# Altium schematic symbol library 一体板.SchLib: 66 symbols
Pins are listed as number, name and electrical type; pins without a type are passive.

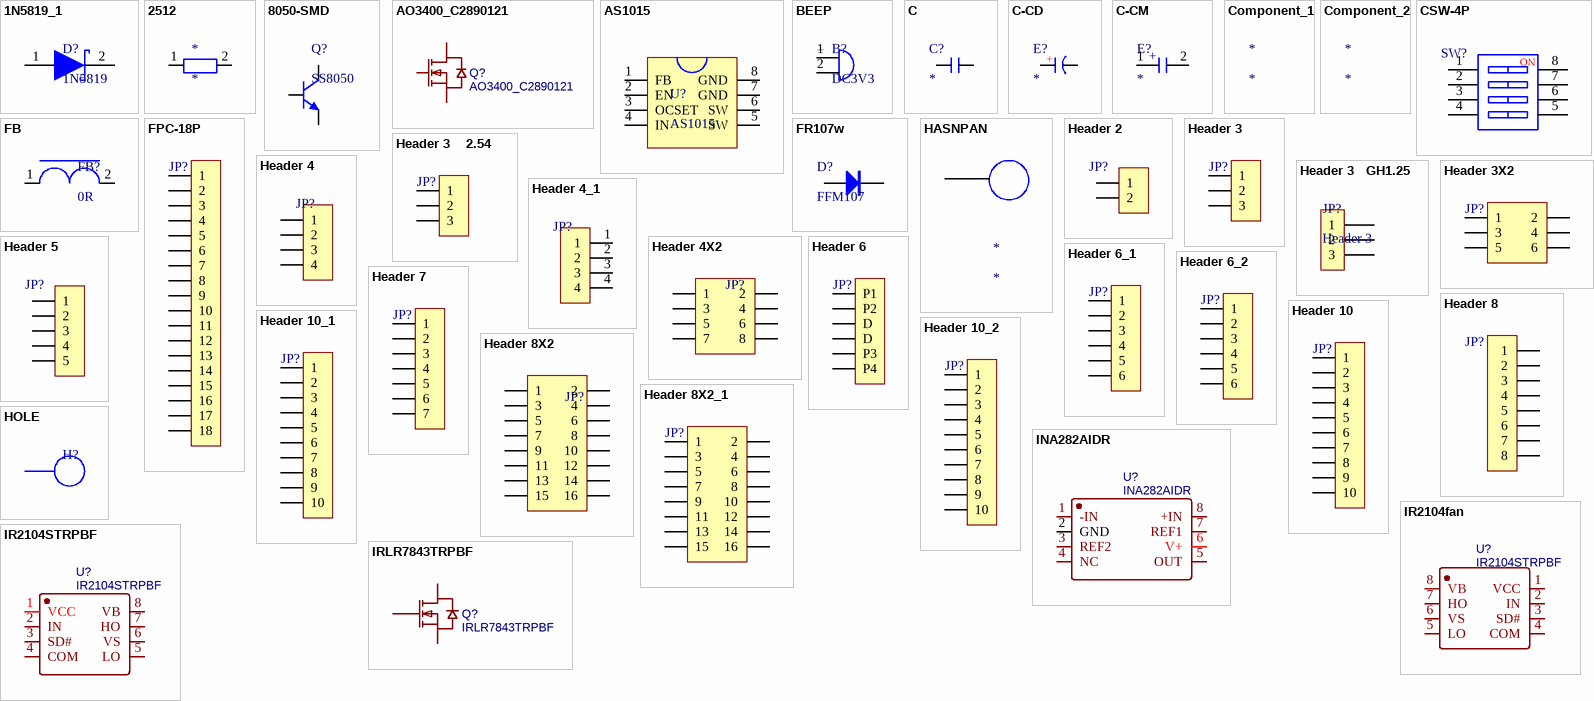
[diagram p0: symbols 1N5819_1 to IRLR7843TRPBF]

## 1N5819_1
designator D?, comment 1N5819
二极管
footprint SOD-123 (2.7x1.6X1.1mm（长宽高，不包括引脚）)
pins: 1, 2

## 2512
designator *
footprint R 2512_M (1W贴片电阻)
pins: 1, 2

## 8050-SMD
designator Q?, comment SS8050
高频放大-NPN型; 版权归属: 源创客; 属性: 40V 1.5A 1W 100MHZ; BOM名称: 高频放大-NPN型; 学习资源: www.ooocke.com
footprint SOT23-3M (3x1.3x1mm(长宽高))
pins: 1 B, 2 E, 3 C

## AO3400_C2890121
designator Q?
BOM_Manufacturer: TECH PUBLIC(台舟); BOM_Manufacturer Part: AO3400; Contributor: LCSC; BOM_Supplier: LCSC; BOM_Supplier Part: C2890121; BOM_JLCPCB Part Class: Extended Part; spicePre: Q; spiceSymbolName: AO3400_C2890121
footprint SOT-23-3_L2.9-W1.6-P1.90-LS2.8-BR
pins: 1 G, 2 S, 3 D

## AS1015
designator U?
IC
footprint SOP8_M (5*6*1.8mm（长宽高）)
pins: 1 FB, 2 EN, 3 OCSET, 4 IN, 5 SW, 6 SW, 7 GND, 8 GND

## BEEP
designator B?, comment DC3V3
蜂鸣器
footprint BEEP 5x9x5.5 (5*9*5.5mm(脚距,直径,高度))
pins: 1 "+", 2
text: +

## C
designator C?
无极性贴片电容; 版权归属: 源创客; 材质: X7R; BOM名称: 无极性贴片电容; 学习资源: www.ooocke.com
footprint C 0603_M (无极性贴片电容)
pins: 1, 2

## C-CD
designator E?
贴片钽电容; 版权归属: 源创客; BOM名称: 贴片钽电容; 学习资源: www.ooocke.com
footprint CD A(3216) (长3.2mm，宽1.6mm，厚1.6mm)
footprint CD D(7343) (长7.3mm，宽4.3mm，厚2.8mm)
pins: 1 A, 2 K
text: +

## C-CM
designator E?
贴片电解电容; 版权归属: 源创客; BOM名称: 贴片电解电容; 学习资源: www.ooocke.com
footprint CT 6*6 - C (直径6mm，高6mm)
footprint CD D(7343) (长7.3mm，宽4.3mm，厚2.8mm)
footprint CT 5*6 - R (直径5mm，高6mm)
pins: 1, 2
text: +

## Component_1
designator *

## Component_2
designator *

## CSW-4P
designator SW?  (value not drawn)
4路编码开关; 版权归属: 源创客; BOM名称: 4路编码开关; 学习资源: www.ooocke.com
footprint CSW DIP-4P (11.7*9.9*7mm)
pins: 1, 2, 3, 4, 5, 6, 7, 8
text: NO

## FB
designator FB?, comment 0R
贴片磁珠
footprint FB 0805_M (小功率贴片磁珠)
pins: 1, 2

## FPC-18P
designator JP?, comment FPC1.0-18P  (value not drawn)
FPC连接器; 版权归属: 源创客; BOM名称: FPC连接器; 学习资源: www.ooocke.com
footprint FPC0.5 2H-WS-18P (长：13.2mm，宽：5.2mm，高：2mm)
pins: 1, 2, 3, 4, 5, 6, 7, 8, 9, 10, 11, 12, 13, 14, 15, 16, 17, 18

## FR107w
designator D?, comment FFM107
快恢复整流二极管; BOM名称: 快恢复二极管; 版权归属: 源创客; 学习资源: www.ooocke.com
footprint SOD-123 (2.7x1.6X1.1mm（长宽高，不包括引脚）)
pins: 1 A, 2 K

## HASNPAN
designator *
footprint LQ_SCROW3&5MM
pins: 0

## Header 2
designator JP?, comment HDR-1X2  (value not drawn)
2P接插件; 版权归属: 源创客; BOM名称: 2P接插件; 学习资源: www.ooocke.com
footprint HDR2.54-LI-2P (排针，2脚)
pins: 1, 2

## Header 3
designator JP?, comment HDR-1X3  (value not drawn)
3P接插件舵机; BOM名称: 3P接插件; 版权归属: 源创客; 学习资源: www.ooocke.com
footprint HDR2.54-LI-3P (排针，3脚)
pins: 1, 2, 3

## Header 3    2.54
designator JP?, comment HDR-1X3  (value not drawn)
3P接插件; 版权归属: 源创客; BOM名称: 3P接插件; 学习资源: www.ooocke.com
footprint XH2.54-LI-3P (接插件，3P)
footprint PH2.0-LS-3P (长：10mm，宽：5.5mm，高：6.1mm)
pins: 1, 2, 3

## Header 3   GH1.25
designator JP?, comment Header 3
插座驱动
footprint GH1.25
pins: 1, 2, 3

## Header 3X2
designator JP?, comment Header3X2  (value not drawn)
3*2P接插件; 版权归属: 源创客; BOM名称: 3*2P接插件; 学习资源: www.ooocke.com
footprint HDR2.54-LI-2x3P (双排排针，3x2脚)
pins: 1, 2, 3, 4, 5, 6

## Header 4
designator JP?, comment HDR-1X4  (value not drawn)
4P接插件; 版权归属: 源创客; BOM名称: 4P接插件; 学习资源: www.ooocke.com
footprint XH2.54-LI-4P (接插件，4P)
footprint HDR2.54-LI-4P (排针，4脚)
pins: 1, 2, 3, 4

## Header 4_1
designator JP?, comment HDR-1X4  (value not drawn)
4P接插件; 版权归属: 源创客; BOM名称: 4P接插件; 学习资源: www.ooocke.com
footprint XH2.54-LI-4P (接插件，4P)
pins: 1, 2, 3, 4

## Header 4X2
designator JP?  (value not drawn)
4*2P接插件; 版权归属: 源创客; BOM名称: 4*2P接插件; 学习资源: www.ooocke.com
footprint HDR2.54-LI-2x4P (双排排针，4x2脚)
footprint HDR2.54-M-LS-2x4P - duplicate (脚距：2.54mm，贴片双排母)
footprint CONN-TH_A2006WV-2X4P
pins: 1, 2, 3, 4, 5, 6, 7, 8

## Header 5
designator JP?, comment HDR-1X5  (value not drawn)
5P接插件; 版权归属: 源创客; BOM名称: 5P接插件; 学习资源: www.ooocke.com
footprint XH2.54-LI-5P (接插件，5P)
pins: 1, 2, 3, 4, 5

## Header 6
designator JP?, comment HDR-1X6  (value not drawn)
6P接插件; 版权归属: 源创客; BOM名称: 6P接插件; 学习资源: www.ooocke.com
footprint HDR2.54-Y-LI-6P (圆孔排母，6脚)
footprint CONN-SMD_6P-P1.25_GH1.25-6PWBPZ
pins: 1 P1, 2 P2, 3 D, 4 D, 5 P3, 6 P4

## Header 6_1
designator JP?, comment HDR-1X6  (value not drawn)
6P接插件; 版权归属: 源创客; BOM名称: 6P接插件; 学习资源: www.ooocke.com
footprint HDR2.54-LI-6P (排针，6脚)
pins: 1, 2, 3, 4, 5, 6

## Header 6_2
designator JP?, comment HDR-1X6  (value not drawn)
6P接插件; 版权归属: 源创客; BOM名称: 6P接插件; 学习资源: www.ooocke.com
footprint HDR2.54-LI-6P (排针，6脚)
footprint CONN-SMD_6P-P1.25_GH1.25-6PWBPZ
pins: 1, 2, 3, 4, 5, 6

## Header 7
designator JP?, comment HDR-1X7  (value not drawn)
7P接插件; 版权归属: 源创客; BOM名称: 7P接插件; 学习资源: www.ooocke.com
footprint HDR2.54-M-LI-7P (排母，7脚)
pins: 1, 2, 3, 4, 5, 6, 7

## Header 8
designator JP?, comment HDR-1X8  (value not drawn)
8P接插件; 版权归属: 源创客; BOM名称: 8P接插件; 学习资源: www.ooocke.com
footprint XH2.54-LI-8P (接插件，8P)
footprint PH2.0-WS-8P (长：20mm，宽：7.6mm，高：5.5mm)
footprint HDR2.54-LI-8P (排针，8脚)
pins: 1, 2, 3, 4, 5, 6, 7, 8

## Header 8X2
designator JP?, comment Camera  (value not drawn)
摄像头插座; BOM名称: 8*2P接插件; 版权归属: 源创客; 学习资源: www.ooocke.com
footprint FPC0.5 2H-WS-16P (Footprint not found)
footprint HDR2.54-M-LS-2x8P (脚距：2.54mm，贴片双排母)
pins: 1, 2, 3, 4, 5, 6, 7, 8, 9, 10, 11, 12, 13, 14, 15, 16

## Header 8X2_1
designator JP?, comment Header 8X2  (value not drawn)
8*2P接插件; 版权归属: 源创客; BOM名称: 8*2P接插件; 学习资源: www.ooocke.com
footprint IDC2.54-LI-2x8P (16P简易牛角座)
footprint HDR2.54-LI-2x8P (双排排针，8x2脚)
footprint HDR2.54-M-LS-2x8P (脚距：2.54mm，贴片双排母)
footprint HDR2.54-WI-2x8P (双排弯脚排针，8x2脚)
footprint Camera (双排排针，8x2脚)
pins: 1, 2, 3, 4, 5, 6, 7, 8, 9, 10, 11, 12, 13, 14, 15, 16

## Header 10
designator JP?, comment HDR-1X10  (value not drawn)
10P接插件; 版权归属: 源创客; BOM名称: 10P接插件; 学习资源: www.ooocke.com
footprint HDR2.54-LI-10P (排针，10脚)
footprint PH2.0-WS-10P (长：24mm，宽：7.6mm，高：5.5mm)
pins: 1, 2, 3, 4, 5, 6, 7, 8, 9, 10

## Header 10_1
designator JP?, comment HDR-1X10  (value not drawn)
10P接插件; 版权归属: 源创客; BOM名称: 10P接插件; 学习资源: www.ooocke.com
footprint HDR2.54-LI-10P (排针，10脚)
footprint PH2.0-WS-10P (长：24mm，宽：7.6mm，高：5.5mm)
pins: 1, 2, 3, 4, 5, 6, 7, 8, 9, 10

## Header 10_2
designator JP?, comment HDR-1X10  (value not drawn)
10P接插件; 版权归属: 源创客; BOM名称: 10P接插件; 学习资源: www.ooocke.com
footprint XH2.54-LS-10P (长：30mm，宽：6mm，高：8.3mm)
pins: 1, 2, 3, 4, 5, 6, 7, 8, 9, 10

## HOLE
designator H?
固定孔
footprint HOLE (固定孔)

## INA282AIDR
designator U?
BOM_Manufacturer: TI; spicePre: X; BOM_Supplier Part: C53319; BOM_Supplier: LCSC; BOM_Manufacturer Part: INA282AIDR; BOM_JLCPCB Part Class: Extended Part; spiceSymbolName: INA282AIDR
footprint SOIC-8_L4.9-W3.9-P1.27-LS6.0-BL
pins: 1 -IN, 2 GND, 3 REF2, 4 NC, 5 OUT, 6 V+, 7 REF1, 8 +IN

## IR2104fan
designator U?, comment IR2104STRPBF
BOM_Manufacturer: IR; spicePre: X; BOM_Supplier: LCSC; BOM_Manufacturer Part: IR2104STRPBF; BOM_Supplier Part: C2960; BOM_JLCPCB Part Class: Extended Part; spiceSymbolName: IR2104STRPBF
footprint SOIC-8_L4.9-W3.9-P1.27-LS6.0-BL
pins: 1 VCC, 2 IN, 3 SD#, 4 COM, 5 LO, 6 VS, 7 HO, 8 VB

## IR2104STRPBF
designator U?
BOM_Manufacturer: IR; spicePre: X; BOM_Supplier: LCSC; BOM_Manufacturer Part: IR2104STRPBF; BOM_Supplier Part: C2960; BOM_JLCPCB Part Class: Extended Part; spiceSymbolName: IR2104STRPBF
footprint SOIC-8_L4.9-W3.9-P1.27-LS6.0-BL
pins: 1 VCC, 2 IN, 3 SD#, 4 COM, 5 LO, 6 VS, 7 HO, 8 VB

## IRLR7843TRPBF
designator Q?
BOM_Manufacturer: IR; BOM_Supplier: LCSC; BOM_Manufacturer Part: IRLR7843TRPBF; BOM_Supplier Part: C21988; BOM_JLCPCB Part Class: Extended Part; spicePre: Q; spiceSymbolName: IRLR7843TRPBF
footprint TO-252-2_L6.5-W6.1-P4.58-LS10.0-TR
pins: 1 G, 3 S, 4 D

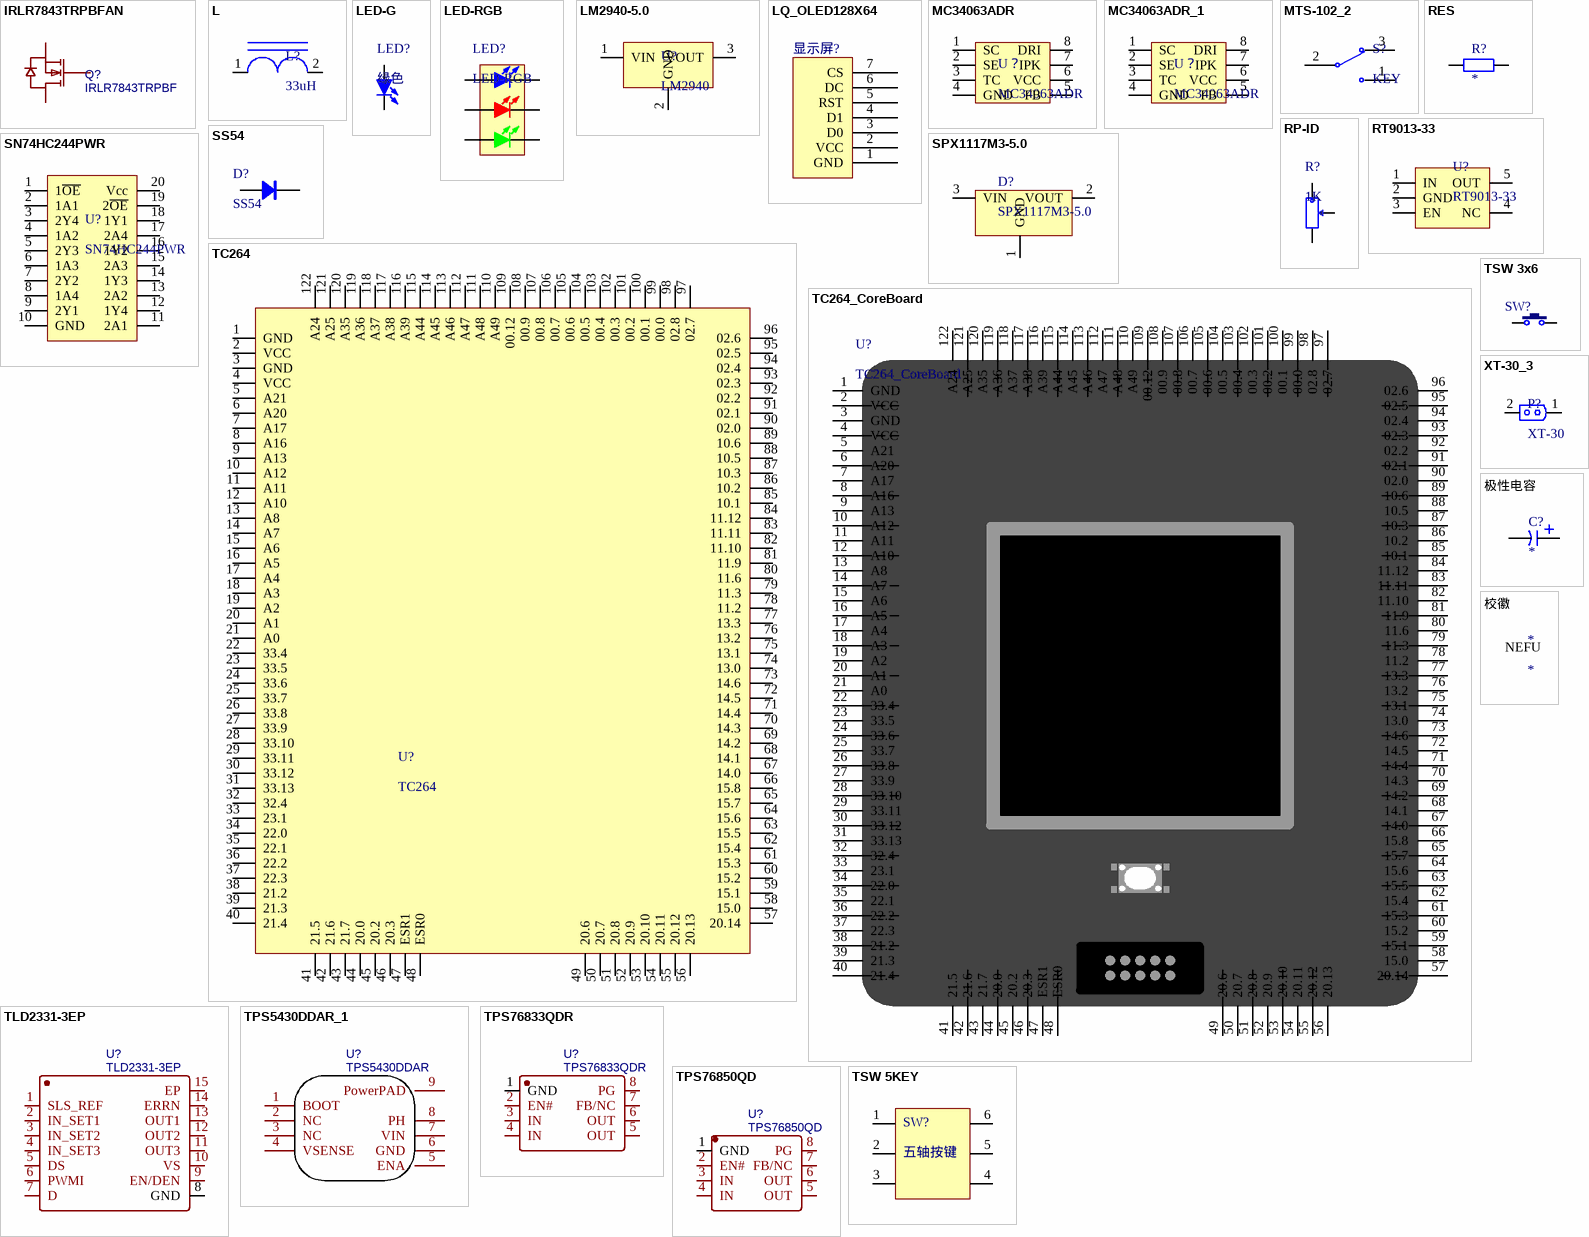
[diagram p1: symbols IRLR7843TRPBFAN to 校徽]

## IRLR7843TRPBFAN
designator Q?, comment IRLR7843TRPBF
BOM_Manufacturer: IR; BOM_Supplier: LCSC; BOM_Manufacturer Part: IRLR7843TRPBF; BOM_Supplier Part: C21988; BOM_JLCPCB Part Class: Extended Part; spicePre: Q; spiceSymbolName: IRLR7843TRPBF
footprint TO-252-2_L6.5-W6.1-P4.58-LS10.0-TR
pins: 1 G, 3 S, 4 D

## L
designator L?, comment 33uH
一体化成型电感
footprint L-SMD-0630 (一体化成型电感)
pins: 1, 2

## LED-G
designator LED?, comment 绿色
贴片LED; 版权归属: 源创客; BOM名称: 贴片LED; 学习资源: www.ooocke.com
footprint LED 0603G (绿色0603LED)
pins: 1 A, 2 K

## LED-RGB
designator LED?
三基色LED; 版权归属: 源创客; BOM名称: 三基色LED; 学习资源: www.ooocke.com
footprint LED 5050 (白色5050LED)
pins: 1 BULE_A, 2 RED_A, 3 GREEN_A, 4 GREEN_K, 5 RED_K, 6 BULE_K

## LM2940-5.0
designator U?, comment LM2940
稳压芯片
footprint TO263-3A (263，3脚晶体管)
footprint SOT223_M (6.4x7x1.6mm(长宽高))
pins: 1 VIN, 2 GND, 3 VOUT

## LQ_OLED128X64
designator 显示屏?, comment 单排座1*7-2.54  (value not drawn)
footprint LQ-TFT-180V33
pins: 1 GND, 2 VCC, 3 D0, 4 D1, 5 RST, 6 DC, 7 CS
2 alternate drawings of the same symbol

## MC34063ADR
designator U？
IC
footprint MC34063ADR (IC)
pins: 1 SC, 2 SE, 3 TC, 4 GND, 5 FB, 6 VCC, 7 IPK, 8 DRI

## MC34063ADR_1
designator U？, comment MC34063ADR
IC
footprint MC34063ADR (IC)
pins: 1 SC, 2 SE, 3 TC, 4 GND, 5 FB, 6 VCC, 7 IPK, 8 DRI

## MTS-102_2
designator S?, comment KEY
开关
footprint MTS-102 (开关)
pins: 1, 2, 3

## RES
designator R?
精密贴片电阻; BOM名称: 精密电阻; 版权归属: 源创客; 学习资源: www.ooocke.com
footprint R 0603_M (1/10W贴片电阻)
footprint Model Name (Footprint not found)
footprint R 0603_M (1/10W贴片电阻)
pins: 1, 2

## RP-ID
designator R?, comment 1K
插件单联电位器; BOM名称: 插件电位器; 版权归属: 源创客; 学习资源: www.ooocke.com
footprint 3296W (Precise Multi-Winding Adjustable Resistor)
pins: 1, 2, 3

## RT9013-33
designator U?
IC
footprint SOT23-5M (3x1.6x1.1mm(长宽高))
pins: 1 IN, 2 GND, 3 EN, 4 NC, 5 OUT

## SN74HC244PWR
designator U?
IC
footprint TSSOP20_M (6.5*6.4*1（长宽高）)
pins: 1 1~{OE}, 2 1A1, 3 2Y4, 4 1A2, 5 2Y3, 6 1A3, 7 2Y2, 8 1A4, 9 2Y1, 10 GND, 11 2A1, 12 1Y4, 13 2A2, 14 1Y3, 15 2A3, 16 1Y2, 17 2A4, 18 1Y1, 19 2~{OE}, 20 Vcc

## SPX1117M3-5.0
designator D?
转压
footprint SOT223_M (6.4x7x1.6mm(长宽高))
pins: 1 GND, 2 VOUT, 3 VIN

## SS54
designator D?
肖特基二极管; 版权归属: 源创客; 属性: 40V/3A; BOM名称: 肖特基二极管; 学习资源: www.ooocke.com
footprint SMA (4.5x2.6*2.2mm（长宽高，不包括引脚）)
pins: 1 A, 2 K

## TC264
designator U?
IC
footprint TC264_CoreBoard (逐飞科技TC264核心板)
pins: 1 GND, 2 VCC, 3 GND, 4 VCC, 5 A21, 6 A20, 7 A17, 8 A16, 9 A13, 10 A12, 11 A11, 12 A10, 13 A8, 14 A7, 15 A6, 16 A5, 17 A4, 18 A3, 19 A2, 20 A1, 21 A0, 22 33.4, 23 33.5, 24 33.6, 25 33.7, 26 33.8, 27 33.9, 28 33.10, 29 33.11, 30 33.12, 31 33.13, 32 32.4, 33 23.1, 34 22.0, 35 22.1, 36 22.2, 37 22.3, 38 21.2, 39 21.3, 40 21.4, 41 21.5, 42 21.6, 43 21.7, 44 20.0, 45 20.2, 46 20.3, 47 ESR1, 48 ESR0, 49 20.6, 50 20.7, 51 20.8, 52 20.9, 53 20.10, 54 20.11, 55 20.12, 56 20.13, 57 20.14, 58 15.0, 59 15.1, 60 15.2, 61 15.3, 62 15.4, 63 15.5, 64 15.6, 65 15.7, 66 15.8, 67 14.0, 68 14.1, 69 14.2, 70 14.3, 71 14.4, 72 14.5, 73 14.6, 74 13.0, 75 13.1, 76 13.2, 77 13.3, 78 11.2, 79 11.3, 80 11.6, 81 11.9, 82 11.10, 83 11.11, 84 11.12, 85 10.1, 86 10.2, 87 10.3, 88 10.5, 89 10.6, 90 02.0, 91 02.1, 92 02.2, 93 02.3, 94 02.4, 95 02.5, 96 02.6, 97 02.7, 98 02.8, 99 00.0, 100 00.1, 101 00.2, 102 00.3, 103 00.4, 104 00.5, 105 00.6, 106 00.7, 107 00.8, 108 00.9, 109 00.12, 110 A49, 111 A48, 112 A47, 113 A46, 114 A45, 115 A44, 116 A39, 117 A38, 118 A37, 119 A36, 120 A35, 121 A25, 122 A24

## TC264_CoreBoard
designator U?
逐飞科技TC264核心板
footprint TC264_CoreBoard (逐飞科技TC264核心板)
pins: 1 GND, 2 VCC, 3 GND, 4 VCC, 5 A21, 6 A20, 7 A17, 8 A16, 9 A13, 10 A12, 11 A11, 12 A10, 13 A8, 14 A7, 15 A6, 16 A5, 17 A4, 18 A3, 19 A2, 20 A1, 21 A0, 22 33.4, 23 33.5, 24 33.6, 25 33.7, 26 33.8, 27 33.9, 28 33.10, 29 33.11, 30 33.12, 31 33.13, 32 32.4, 33 23.1, 34 22.0, 35 22.1, 36 22.2, 37 22.3, 38 21.2, 39 21.3, 40 21.4, 41 21.5, 42 21.6, 43 21.7, 44 20.0, 45 20.2, 46 20.3, 47 ESR1, 48 ESR0, 49 20.6, 50 20.7, 51 20.8, 52 20.9, 53 20.10, 54 20.11, 55 20.12, 56 20.13, 57 20.14, 58 15.0, 59 15.1, 60 15.2, 61 15.3, 62 15.4, 63 15.5, 64 15.6, 65 15.7, 66 15.8, 67 14.0, 68 14.1, 69 14.2, 70 14.3, 71 14.4, 72 14.5, 73 14.6, 74 13.0, 75 13.1, 76 13.2, 77 13.3, 78 11.2, 79 11.3, 80 11.6, 81 11.9, 82 11.10, 83 11.11, 84 11.12, 85 10.1, 86 10.2, 87 10.3, 88 10.5, 89 10.6, 90 02.0, 91 02.1, 92 02.2, 93 02.3, 94 02.4, 95 02.5, 96 02.6, 97 02.7, 98 02.8, 99 00.0, 100 00.1, 101 00.2, 102 00.3, 103 00.4, 104 00.5, 105 00.6, 106 00.7, 107 00.8, 108 00.9, 109 00.12, 110 A49, 111 A48, 112 A47, 113 A46, 114 A45, 115 A44, 116 A39, 117 A38, 118 A37, 119 A36, 120 A35, 121 A25, 122 A24

## TLD2331-3EP
designator U?
BOM_Manufacturer: Infineon(英飞凌); Contributor: LCSC; BOM_Supplier: LCSC; BOM_Supplier Part: C539647; BOM_Manufacturer Part: TLD2331-3EP; Frequency: -; BOM_JLCPCB Part Class: Extended Part; spicePre: U; spiceSymbolName: TLD2331-3EP
footprint PG-TSDSO-14_L4.9-W3.9-P0.65-LS6.0-BL-EP
pins: 1 SLS_REF, 2 IN_SET1, 3 IN_SET2, 4 IN_SET3, 5 DS, 6 PWMI, 7 D, 8 GND, 9 EN/DEN, 10 VS, 11 OUT3, 12 OUT2, 13 OUT1, 14 ERRN, 15 EP

## TPS5430DDAR_1
designator U?, comment TPS5430DDAR
BOM_Manufacturer: TI; BOM_Supplier: LCSC; BOM_Manufacturer Part: TPS5430DDAR; BOM_Supplier Part: C9864; BOM_JLCPCB Part Class: Basic Part; spicePre: U; spiceSymbolName: TPS5430DDAR
footprint SOIC-8_L5.0-W4.0-P1.27-LS6.0-BL-EP2.0
pins: 1 BOOT, 2 NC, 3 NC, 4 VSENSE, 5 ENA, 6 GND, 7 VIN, 8 PH, 9 PowerPAD

## TPS76833QDR
designator U?
BOM_Manufacturer: TI; BOM_Supplier: LCSC; BOM_Manufacturer Part: TPS76833QDR; BOM_Supplier Part: C16002; BOM_JLCPCB Part Class: Extended Part; spicePre: U; spiceSymbolName: TPS76833QDR
footprint SOIC-8_L4.9-W3.9-P1.27-LS6.0-BL
pins: 1 GND, 2 EN#, 3 IN, 4 IN, 5 OUT, 6 OUT, 7 FB/NC, 8 PG

## TPS76850QD
designator U?
BOM_Manufacturer: Texas Instruments; Contributor: LCSC; BOM_Supplier: LCSC; BOM_Supplier Part: C194763; BOM_Manufacturer Part: TPS76850QD; BOM_JLCPCB Part Class: Extended Part; spicePre: U; spiceSymbolName: TPS76850QD
footprint SOIC-8_L4.9-W3.9-P1.27-LS6.0-BL
pins: 1 GND, 2 EN#, 3 IN, 4 IN, 5 OUT, 6 OUT, 7 FB/NC, 8 PG

## TSW 3x6
designator SW?, comment 3x6x5  (value not drawn)
3x6轻触开关; 版权归属: 源创客; BOM名称: 3x6轻触开关; 学习资源: www.ooocke.com
footprint TSW SMD-3*6*2.5 - duplicate (3*6*2.5mm)
pins: 1, 2

## TSW 5KEY
designator SW?, comment 五轴按键
footprint TSW 10x10x9-5Key-LS (6脚，长：10.5，宽：10，高：9mm)
pins: 1, 2, 3, 4, 5, 6

## XT-30_3
designator P?, comment XT-30
接口
footprint xt-30 (长：16mm，宽：8.2mm，高：16mm)
pins: 1, 2

## 极性电容
designator C?
极性电容
footprint CAP 5.0*10*12.5 - GD (脚距5mm直径10mm高度12.5mm)
footprint 铝电解
pins: 1, 2

## 校徽
designator *
footprint 校徽300mil
text: NEFU